# Altium schematic symbol library CONNECTORS.SchLib: 2 symbols
Pins are listed as number, name and electrical type; pins without a type are passive.

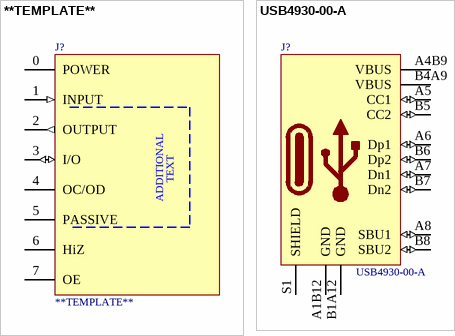
[diagram p0: symbols **TEMPLATE** to USB4930-00-A]

## **TEMPLATE**
designator J?
PLEASE COPY TO CREATE NEW COMPONENT; Pitch: *; Positions: *; Rows: *; Orientation: *; Mounting Type: *; Usage: *; Manufacturer 1: *; Part Number 1: *; Manufacturer 2: *; Part Number 2: *
pins: 0 POWER (power), 1 INPUT (in), 2 OUTPUT (out), 3 I/O (io), 4 OC/OD (oc), 5 PASSIVE (oc), 6 HiZ (hiz), 7 OE (oe)
text: ADDITIONAL; TEXT

## USB4930-00-A
designator J?
USB-C Connector, USB Type C, USB 2.0, Receptacle, 16 Ways, Surface Mount, Through Hole Mount; Manufacturer 1: GCT; Positions: 16(12); Rows: 1; Pitch: N/A; Orientation: Right; Mounting Type: Mixed; Usage: USB-C; Part Number 1: USB4930-00-A; Manufacturer 2: *; Part Number 2: *; ComponentLink1Description: Outline drawing; ComponentLink1URL: https://gct.co/files/drawings/usb4930.pdf
pins: A1B12 GND (power), A4B9 VBUS (power), A5 CC1 (io), A6 Dp1 (io), A7 Dn1 (io), A8 SBU1 (io), B1A12 GND (power), B4A9 VBUS (power), B5 CC2 (io), B6 Dp2 (io), B7 Dn2 (io), B8 SBU2 (io), S1 SHIELD